# Altium schematic symbol library Connector_RF.SchLib: 2 symbols
Pins are listed as number, name and electrical type; pins without a type are passive.

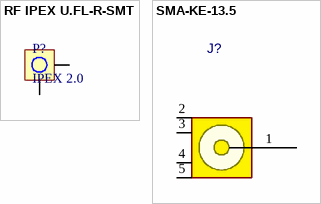
[diagram p0: symbols RF IPEX U.FL-R-SMT to SMA-KE-13.5]

## RF IPEX U.FL-R-SMT
designator P?, comment IPEX 2.0
RF IPEX U.FL-R-SMT 2 Pin SMD, D=2.0mm; Code: 6003-072
footprint IPEX_2.0
pins: 1 ANT, 2 GND

## SMA-KE-13.5
designator J?  (value not drawn)
CONN, RF, SMA, Edge mounting SMA-KE; Code: 3547-006; Designed by: TranLuyen
footprint SMA_EM (SMA-J-P-H-ST-EM1 edge mounting)
pins: 1 SIG, 2 G1, 3 G2, 4 G3, 5 G4